# EAGLE library part 6200XX21821_62003221821 (library WR-PHD)
WR-PHD 2.00 mm Dual Socket Header Article Properties Pins 4 unitless; 6 unitless; 8 unitless; 10 unitless; 14 unitless; 16 unitless; 20 unitless; 24 unitless; 28 unitless; 32 unitless; 40 unitless; 44 unitless General Information Operating Temperature -40 °C up to +105 °C Compliance Lead free / RoHS Pitch 2 mm Durability 50 Cycles Rows Dual Gender Socket Header Type Straight Material Properties Insulator Material PA9T Insulator Flammability Rating UL94 V-0 Contact Material Copper Alloy Contact Plating Gold Contact Type Stamped Certification UL Approval E323964 Packaging Properties Packaging Tube Electrical Properties IR 2 A Withstanding Voltage 500 V (AC) Contact Resistance 20 mΩ RISO 1000 MΩ <https://www.we-online.com/components/media/o33221v209%20Family_WR-PHD_6200xx21821.jpg> Details see: www.we-online.com/en/components/products/PHD_2_00_DUAL_SOCKET_HEADER_6200XX21821 <www.we-online.com/catalog/PHD_2_00_DUAL_SOCKET_HEADER_6200XX21821/?utm_source=eagle_model&utm_medium=description_link&utm_campaign=eisos_eagle> Updated by Ella 2024-02-27 2024 (C) Würth Elektronik
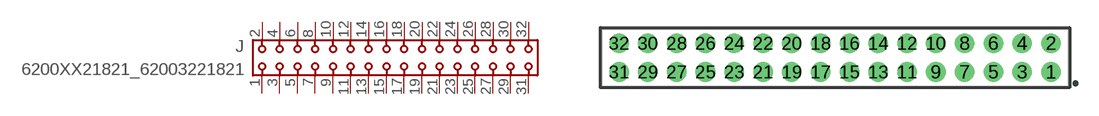
[diagram p338: symbol with the pads of 62003221821; footprint 62003221821]

Designator prefix J

## 6200XX21821_62003221821 (DATASHEET-URL: https://www.we-online.com/redexpert/spec/62003221821?ae; GENDER: Socket Header; IR: 2A; MOUNT: THT; PACKAGING: Tube; PART-NUMBER: 62003221821; PINS: 32; PITCH: 2.00 mm; ROWS: Dual; TYPE: Straight; VALUE: 62003221821)  [62003221821]
1  1  pas
2  2  pas
3  3  pas
4  4  pas
5  5  pas
6  6  pas
7  7  pas
8  8  pas
9  9  pas
10  10  pas
11  11  pas
12  12  pas
13  13  pas
14  14  pas
15  15  pas
16  16  pas
17  17  pas
18  18  pas
19  19  pas
20  20  pas
21  21  pas
22  22  pas
23  23  pas
24  24  pas
25  25  pas
26  26  pas
27  27  pas
28  28  pas
29  29  pas
30  30  pas
31  31  pas
32  32  pas

## Footprint 62003221821 (pad centres in mm)
WR-PHD 2.00 mm Dual Socket Header THT,32 Pins
drill 0.85: 1 15,-1; 2 15,1; 3 13,-1; 4 13,1; 5 11,-1; 6 11,1; 7 9,-1; 8 9,1; 9 7,-1; 10 7,1; 11 5,-1; 12 5,1; 13 3,-1; 14 3,1; 15 1,-1; 16 1,1; 17 -1,-1; 18 -1,1; 19 -3,-1; 20 -3,1; 21 -5,-1; 22 -5,1; 23 -7,-1; 24 -7,1; 25 -9,-1; 26 -9,1; 27 -11,-1; 28 -11,1; 29 -13,-1; 30 -13,1; 31 -15,-1; 32 -15,1